# Altium schematic symbol library PJ-045H.SchLib: 1 symbol
Pins are listed as number, name and electrical type; pins without a type are passive.

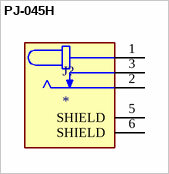
[diagram p0: symbol PJ-045H]

## PJ-045H
designator J?
1.65 x 4.5 mm, 5.0 A, Horizontal, Through Hole, Shielded, Dc Power Jack Connector; MPN: PJ-045H; MANUFACTURER: Same Sky; DATASHEET_URL: https://s3.amazonaws.com/snapeda/datasheet/PJ-045H_CUI_Devices.pdf; SOURCE_URL: https://www.snapeda.com/parts/PJ-045H/Same+Sky/view-part/; Value: *
footprint CUI_PJ-045H
pins: 1, 2, 3, 5 SHIELD, 6 SHIELD